# Altium footprint library 24V转15V电源模块_MORNSUN URA2415YMD-15WR3.PcbLib: 1 footprints
Each footprint in its own frame and in the unit in brackets; x right, y up, seen from the top. Pads: shape width x height; smd on the part's side, far side on the other; paste and mask are expansions set on the pad; w line width, h text height; cw(c..) or ccw(c..) is an arc to the next point about the centre after c.
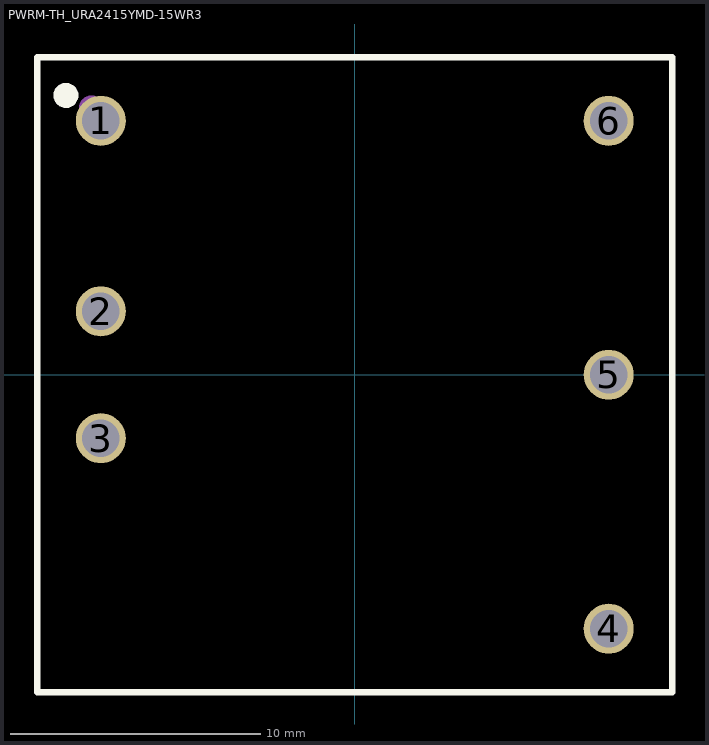
[diagram p0: the footprint, top view; thin cyan lines are the x and y axes]

## PWRM-TH_URA2415YMD-15WR3 [mm]
pads (6):
  round 2 hole 1.5: 1(-10.16,10.16) 2(-10.16,2.54) 3(-10.16,-2.54) 4(10.16,-10.16) 5(10.16,0) 6(10.16,10.16)
Top Overlay:
  circle w0.5: c-11.557,11.176 r0.25
  lines w0.254: -12.7,-12.7 12.7,-12.7 12.7,12.7 -12.7,12.7 -12.7,-12.7
Mechanical 2:
  circle w0.5: c-10.541,10.668 r0.25
Mechanical 6:
  lines w0.051: -12.7,-12.7 12.7,-12.7 12.7,12.7 -12.7,12.7 -12.7,-12.7
Mechanical 8:
  region: -12.64,12.7 -12.64,12.675 -12.675,12.64 -12.725,12.64 -12.76,12.675 -12.76,12.7 -12.76,12.725 -12.725,12.76 -12.675,12.76 -12.64,12.725 -12.64,12.7
Mechanical 9:
  region: 10.66,10.16 10.66,10.061 10.584,9.877 10.443,9.736 10.259,9.66 10.061,9.66 9.877,9.736 9.736,9.877 9.66,10.061 9.66,10.16 9.66,10.259 9.736,10.443 9.877,10.584 10.061,10.66 10.259,10.66 10.443,10.584 10.584,10.443 10.66,10.259 10.66,10.16
  region: 10.66,0 10.66,-0.099 10.584,-0.283 10.443,-0.424 10.259,-0.5 10.061,-0.5 9.877,-0.424 9.736,-0.283 9.66,-0.099 9.66,0 9.66,0.099 9.736,0.283 9.877,0.424 10.061,0.5 10.259,0.5 10.443,0.424 10.584,0.283 10.66,0.099 10.66,0
  region: 10.66,-10.16 10.66,-10.259 10.584,-10.443 10.443,-10.584 10.259,-10.66 10.061,-10.66 9.877,-10.584 9.736,-10.443 9.66,-10.259 9.66,-10.16 9.66,-10.061 9.736,-9.877 9.877,-9.736 10.061,-9.66 10.259,-9.66 10.443,-9.736 10.584,-9.877 10.66,-10.061 10.66,-10.16
  region: -9.66,-2.54 -9.66,-2.639 -9.736,-2.823 -9.877,-2.964 -10.061,-3.04 -10.259,-3.04 -10.443,-2.964 -10.584,-2.823 -10.66,-2.639 -10.66,-2.54 -10.66,-2.441 -10.584,-2.257 -10.443,-2.116 -10.259,-2.04 -10.061,-2.04 -9.877,-2.116 -9.736,-2.257 -9.66,-2.441 -9.66,-2.54
  region: -9.66,2.54 -9.66,2.441 -9.736,2.257 -9.877,2.116 -10.061,2.04 -10.259,2.04 -10.443,2.116 -10.584,2.257 -10.66,2.441 -10.66,2.54 -10.66,2.639 -10.584,2.823 -10.443,2.964 -10.259,3.04 -10.061,3.04 -9.877,2.964 -9.736,2.823 -9.66,2.639 -9.66,2.54
  region: -9.66,10.16 -9.66,10.061 -9.736,9.877 -9.877,9.736 -10.061,9.66 -10.259,9.66 -10.443,9.736 -10.584,9.877 -10.66,10.061 -10.66,10.16 -10.66,10.259 -10.584,10.443 -10.443,10.584 -10.259,10.66 -10.061,10.66 -9.877,10.584 -9.736,10.443 -9.66,10.259 -9.66,10.16